# Altium schematic symbol library CIGT201610EH1R0MNE.SchLib: 1 symbol
Pins are listed as number, name and electrical type; pins without a type are passive.

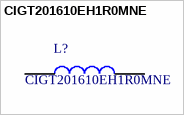
[diagram p0: symbol CIGT201610EH1R0MNE]

## CIGT201610EH1R0MNE
designator L?
RF Inductors - SMD CIGT,Thin Film,0806,1.0uH,1.0?,7 embossed,-20 20%; Manufacturer_Name: SAMSUNG; Geometry.Height: 1mm; Manufacturer_Part_Number: CIGT201610EH1R0MNE; Mouser Part Number: 187-CIGT201610EH1R0M; Mouser Price/Stock: https://www.mouser.co.uk/ProductDetail/Samsung-Electro-Mechanics/CIGT201610EH1R0MNE?qs=xZ%2FP%252Ba9zWqaBrqhkAlUALQ%3D%3D; Arrow Part Number: CIGT201610EH1R0MNE; Arrow Price/Stock: https://www.arrow.com/en/products/cigt201610eh1r0mne/samsung-electro-mechanics?region=nac; Datasheet Link: https://www.mouser.com/ProductDetail/Samsung-Electro-Mechanics/CIGT201610EH1R0MNE?qs=xZ%2FP%252Ba9zWqaBrqhkAlUALQ%3D%3D&utm_id=22030780983&gad_source=1&gclid=EAIaIQobChMIvLSdy--WiwMVck1HAR1lcz2jEAAYAyAAEgL_IvD_BwE
footprint INDC2016X100N
pins: 1, 2